# Altium footprint library 730960.PcbLib: 1 footprints
Each footprint in its own frame and in the unit in brackets; x right, y up, seen from the top. Pads: shape width x height; smd on the part's side, far side on the other; paste and mask are expansions set on the pad; w line width, h text height; cw(c..) or ccw(c..) is an arc to the next point about the centre after c.
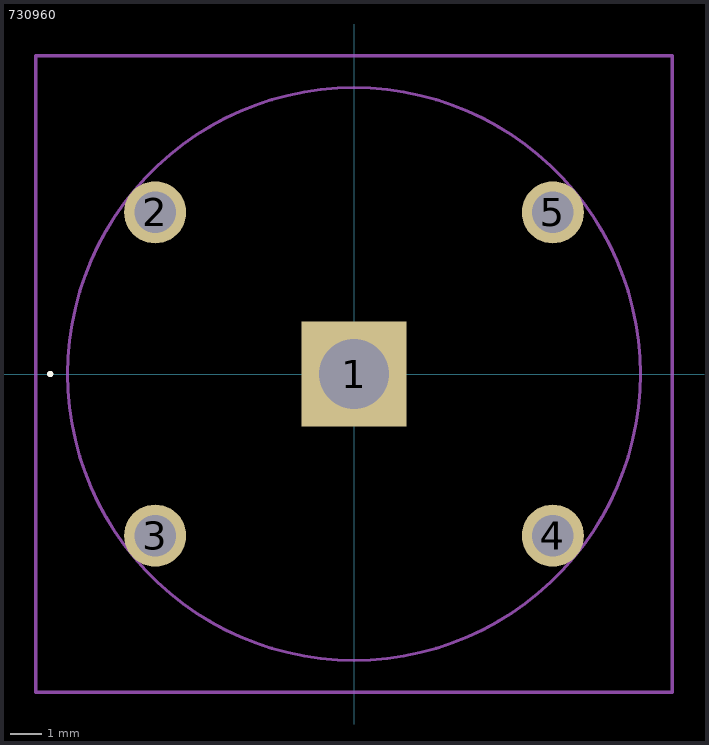
[diagram p0: the footprint, top view; thin cyan lines are the x and y axes]

## 730960 [mm]
pads (5):
  rect 3.3x3.3 hole 2.2: 1(0,0)
  round 1.95 hole 1.3: 2(-6.25,5.08) 3(-6.25,-5.08) 4(6.25,-5.08) 5(6.25,5.08)
Top Overlay:
  lines w0.1: -9.6,0 ccw(c-9.55,0) -9.5,0 ccw(c-9.55,0) -9.6,0
Mechanical 15:
  lines w0.1: -9,0 cw(c0,0) 9,0 cw(c0,0) -9,0
Mechanical 20:
  lines w0.1: -10,-10 -10,10 10,10 10,-10 -10,-10
3D body "73096-0.stp": height 26.67, standoff -3.18, extent -8.988,-8.987 8.988,8.987